# Altium footprint library Test-socket.PcbLib: 1 footprints
Each footprint in its own frame and in the unit in brackets; x right, y up, seen from the top. Pads: shape width x height; smd on the part's side, far side on the other; paste and mask are expansions set on the pad; w line width, h text height; cw(c..) or ccw(c..) is an arc to the next point about the centre after c.
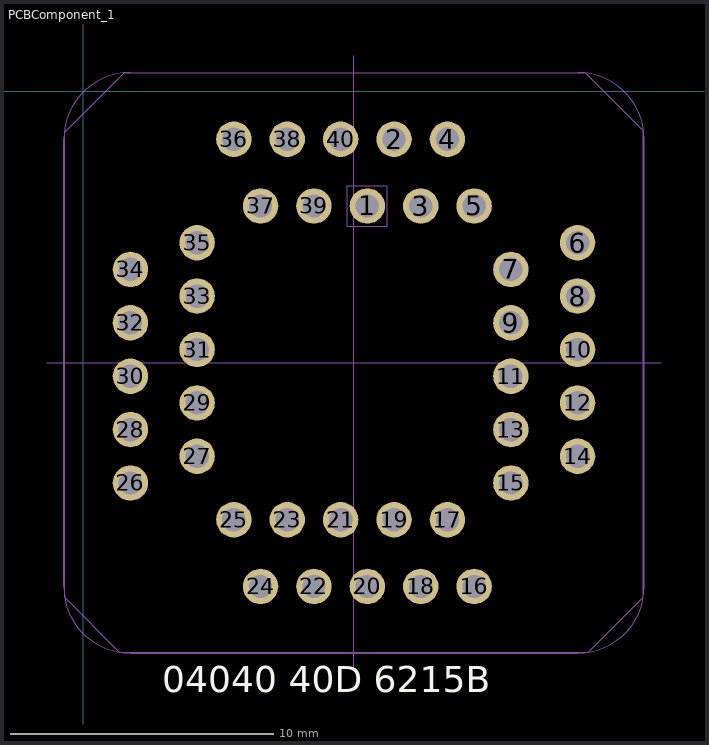
[diagram p0: the footprint, top view; thin cyan lines are the x and y axes]

## PCBComponent_1 [mm]
pads (40):
  round 1.35 hole 0.889: 1(10.815,-4.369) 2(11.831,-1.829) 3(12.847,-4.369) 4(13.863,-1.829) 5(14.879,-4.369) 6(18.816,-5.766) 7(16.276,-6.782) 8(18.816,-7.798) 9(16.276,-8.814) 10(18.816,-9.83) 11(16.276,-10.846) 12(18.816,-11.862) 13(16.276,-12.878) 14(18.816,-13.894) 15(16.276,-14.91) 16(14.879,-18.847) 17(13.863,-16.307) 18(12.847,-18.847) 19(11.831,-16.307) 20(10.815,-18.847) 21(9.799,-16.307) 22(8.783,-18.847) 23(7.767,-16.307) 24(6.751,-18.847) 25(5.735,-16.307) 26(1.798,-14.91) 27(4.338,-13.894) 28(1.798,-12.878) 29(4.338,-11.862) 30(1.798,-10.846) 31(4.338,-9.83) 32(1.798,-8.814) 33(4.338,-7.798) 34(1.798,-6.782) 35(4.338,-5.766) 36(5.735,-1.829) 37(6.751,-4.369) 38(7.767,-1.829) 39(8.783,-4.369) 40(9.799,-1.829)
Top Overlay:
  text "04040 40D 6215B" at 3.004,-22.871 h1
Mechanical 1:
  circle w0.013: c10.815,-18.847 r0.445
  circle w0.013: c6.751,-18.847 r0.445
  circle w0.013: c8.783,-18.847 r0.445
  circle w0.013: c12.847,-18.847 r0.445
  circle w0.013: c14.879,-18.847 r0.445
  circle w0.013: c9.799,-16.307 r0.445
  circle w0.013: c13.863,-16.307 r0.445
  circle w0.013: c7.767,-16.307 r0.445
  circle w0.013: c5.735,-16.307 r0.445
  circle w0.013: c11.831,-16.307 r0.445
  circle w0.013: c1.798,-14.91 r0.445
  circle w0.013: c1.798,-12.878 r0.445
  circle w0.013: c1.798,-6.782 r0.445
  circle w0.013: c1.798,-10.846 r0.445
  circle w0.013: c1.798,-8.814 r0.445
  circle w0.013: c4.338,-13.894 r0.445
  circle w0.013: c4.338,-11.862 r0.445
  circle w0.013: c4.338,-5.766 r0.445
  circle w0.013: c4.338,-9.83 r0.445
  circle w0.013: c4.338,-7.798 r0.445
  circle w0.013: c5.735,-1.829 r0.445
  circle w0.013: c6.751,-4.369 r0.445
  circle w0.013: c7.767,-1.829 r0.445
  circle w0.013: c8.783,-4.369 r0.445
  circle w0.013: c9.799,-1.829 r0.445
  circle w0.013: c10.815,-4.369 r0.445
  circle w0.013: c11.831,-1.829 r0.445
  circle w0.013: c12.847,-4.369 r0.445
  circle w0.013: c13.863,-1.829 r0.445
  circle w0.013: c14.879,-4.369 r0.445
  circle w0.013: c16.276,-14.91 r0.445
  circle w0.013: c16.276,-12.878 r0.445
  circle w0.013: c16.276,-8.814 r0.445
  circle w0.013: c16.276,-10.846 r0.445
  circle w0.013: c16.276,-6.782 r0.445
  circle w0.013: c18.816,-13.894 r0.445
  circle w0.013: c18.816,-9.83 r0.445
  circle w0.013: c18.816,-7.798 r0.445
  circle w0.013: c18.816,-5.766 r0.445
  circle w0.013: c18.816,-11.862 r0.445
Mechanical 2:
  lines w0.013: -1.377,-10.338 21.991,-10.338 ; 10.307,-22.022 10.307,1.346
Mechanical 3:
  lines w0.013: -0.742,-18.847 ccw(c1.798,-18.847) 1.798,-21.387 18.816,-21.387 ccw(c18.816,-18.847) 21.356,-18.847 21.356,-1.829 ccw(c18.816,-1.829) 18.816,0.711 1.798,0.711 ccw(c1.798,-1.829) -0.742,-1.829 -0.742,-18.847
Top Courtyard:
  lines w0.01: -0.705,-19.262 -0.705,-1.567 1.562,0.7 3.125,0.7 19.103,0.7 21.311,-1.508 21.311,-19.264 19.225,-21.35 1.383,-21.35 -0.705,-19.262
Mechanical 7:
  lines w0.013: 10.053,-5.131 11.577,-5.131 11.577,-3.607 10.053,-3.607 10.053,-5.131
Mechanical 8: